# Altium footprint library 1.10-电容.PcbLib: 193 footprints (part 7 of 13)
Each footprint in its own frame and in the unit in brackets; x right, y up, seen from the top. Pads: shape width x height; smd on the part's side, far side on the other; paste and mask are expansions set on the pad; w line width, h text height; cw(c..) or ccw(c..) is an arc to the next point about the centre after c.
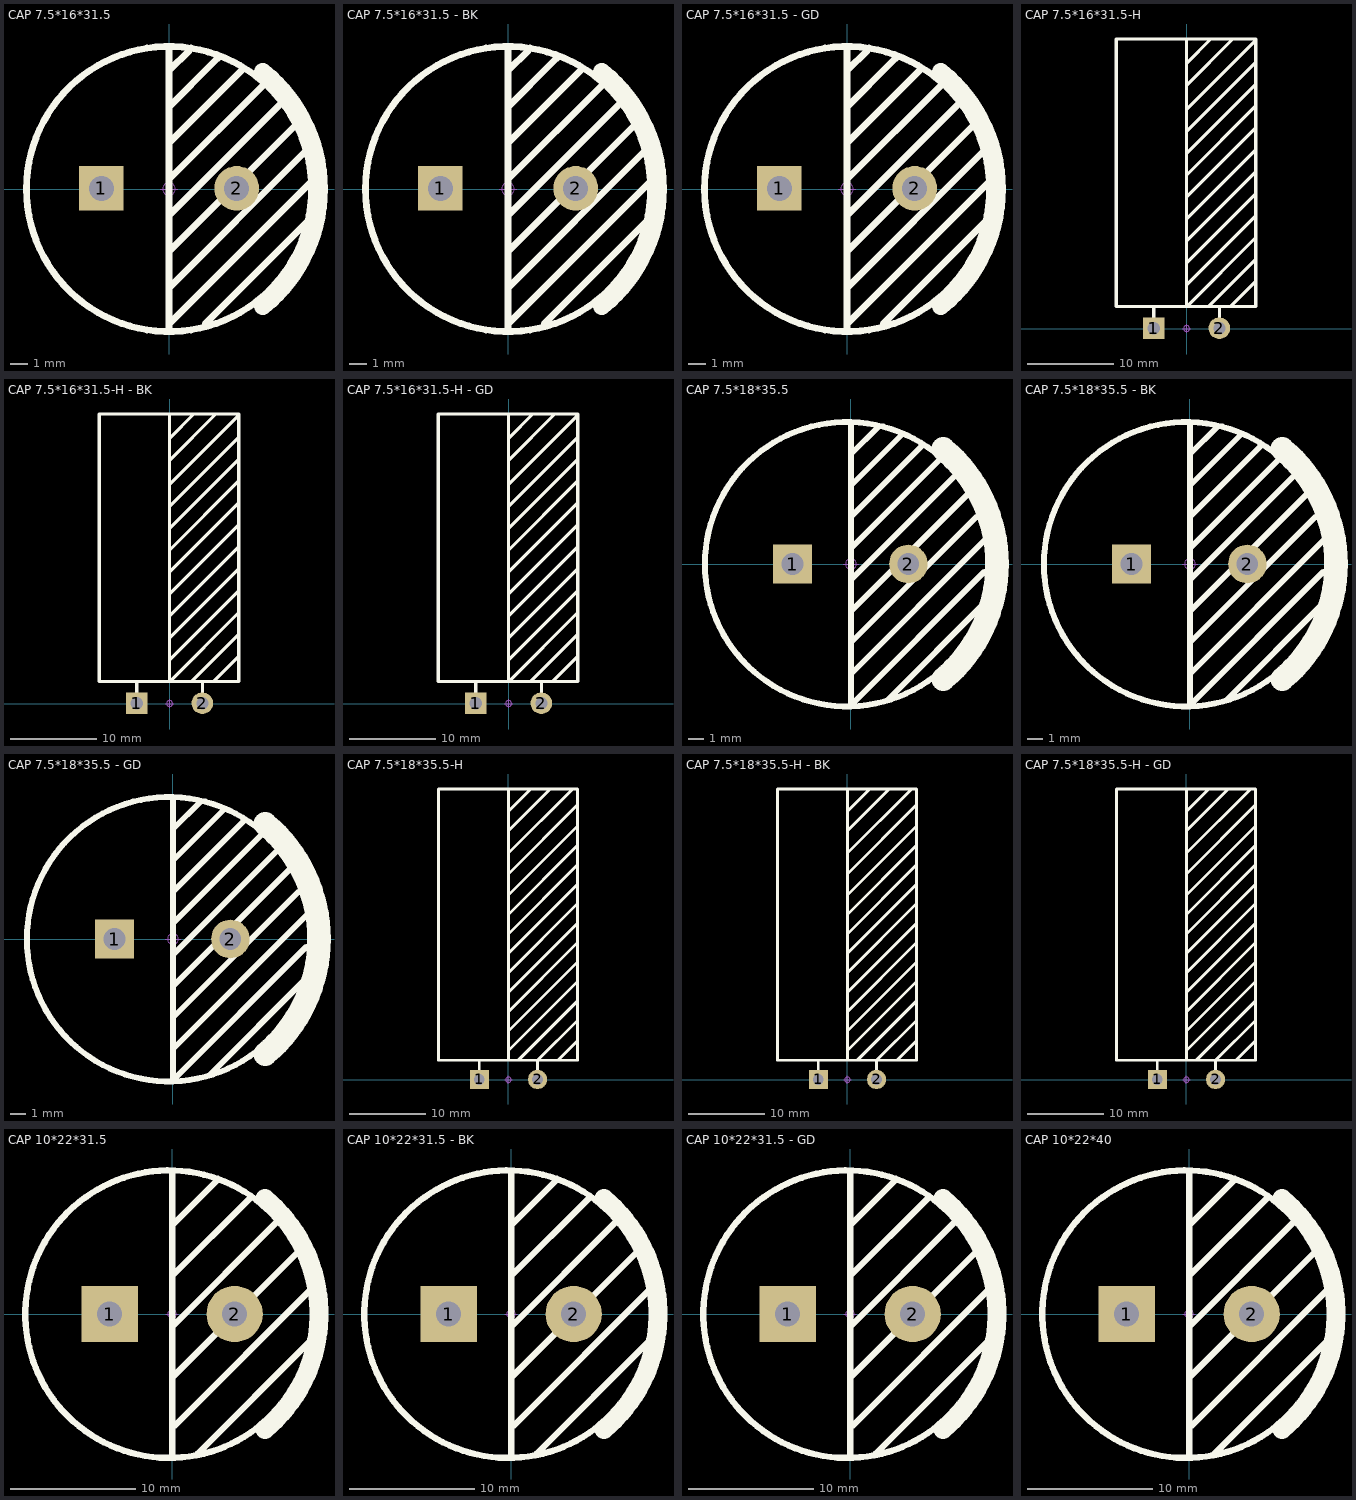
[diagram p6: the footprints below, top view; thin cyan lines are the x and y axes]

## CAP 7.5*16*31.5 [mm] "脚距7.5mm直径16mm高度31.5mm"
pads (2):
  rect 2.5x2.5 hole 1.4: 1(-3.8,0.038)
  round 2.5 hole 1.4: 2(3.8,0.038)
Top Overlay:
  circle w0.381: c0,0 r8
  lines w0.381: 0,-7.963 0,7.963 ; 0,-7.582 8.001,0.419 ; 0,-5.55 7.62,2.07 ; 0,-3.518 6.972,3.454 ; 0,-1.486 6.223,4.737 ; 0,0.546 5.296,5.842 ; 0,2.578 4.064,6.642 ; 0,4.61 2.54,7.15 2.769,7.379 ; 0,6.642 1.143,7.785 ; 2.032,-7.582 6.604,-3.01 7.81,-1.803
  lines w1: 5.259,-6.574 ccw(c0,0) 5.259,6.574
Mechanical 15:
  circle w0.05: c0,0 r0.35
  lines w0.05: -0.5,0 0.5,0 ; 0,-0.5 0,0.5
3D body "CAP 7.5X16X31.STEP": height 31.53, standoff -3.38, extent -8,-7.998 8.01,7.998

## CAP 7.5*16*31.5 - BK [mm] "脚距7.5mm直径16mm高度31.5mm"
pads (2):
  rect 2.5x2.5 hole 1.4: 1(-3.8,0.038)
  round 2.5 hole 1.4: 2(3.8,0.038)
Top Overlay:
  circle w0.381: c0,0 r8
  lines w0.381: 0,-7.963 0,7.963 ; 0,-7.582 8.001,0.419 ; 0,-5.55 7.62,2.07 ; 0,-3.518 6.972,3.454 ; 0,-1.486 6.223,4.737 ; 0,0.546 5.296,5.842 ; 0,2.578 4.064,6.642 ; 0,4.61 2.54,7.15 2.769,7.379 ; 0,6.642 1.143,7.785 ; 2.032,-7.582 6.604,-3.01 7.81,-1.803
  lines w1: 5.259,-6.574 ccw(c0,0) 5.259,6.574
Mechanical 15:
  circle w0.05: c0,0 r0.35
  lines w0.05: -0.5,0 0.5,0 ; 0,-0.5 0,0.5
3D body "CAP 7.5X16X31.5.STEP": height 31.54, standoff -3.37, extent -8,-7.998 8.01,7.998

## CAP 7.5*16*31.5 - GD [mm] "脚距7.5mm直径16mm高度31.5mm"
pads (2):
  rect 2.5x2.5 hole 1.4: 1(-3.8,0.038)
  round 2.5 hole 1.4: 2(3.8,0.038)
Top Overlay:
  circle w0.381: c0,0 r8
  lines w0.381: 0,-7.963 0,7.963 ; 0,-7.582 8.001,0.419 ; 0,-5.55 7.62,2.07 ; 0,-3.518 6.972,3.454 ; 0,-1.486 6.223,4.737 ; 0,0.546 5.296,5.842 ; 0,2.578 4.064,6.642 ; 0,4.61 2.54,7.15 2.769,7.379 ; 0,6.642 1.143,7.785 ; 2.032,-7.582 6.604,-3.01 7.81,-1.803
  lines w1: 5.259,-6.574 ccw(c0,0) 5.259,6.574
Mechanical 15:
  circle w0.05: c0,0 r0.35
  lines w0.05: -0.5,0 0.5,0 ; 0,-0.5 0,0.5
3D body "CAP 7.5X16X31.5.STEP": height 31.54, standoff -3.37, extent -8,-7.998 8.01,7.998

## CAP 7.5*16*31.5-H [mm] "脚距7.5mm直径16mm高度31.5mm"
pads (2):
  rect 2.5x2.5 hole 1.4: 1(-3.8,0.038)
  round 2.5 hole 1.4: 2(3.8,0.038)
Top Overlay:
  lines w0.381: -3.81,1.27 -3.81,2.54 ; 0,5.08 8.001,13.081 ; 0,7.62 7.938,15.557 ; 0,10.16 7.938,18.098 ; 0,12.7 7.938,20.637 ; 0,15.24 7.938,23.177 ; 0,17.78 7.938,25.717 ; 0,20.32 7.938,28.258 ; 0,22.86 7.938,30.797 ; 0,25.4 7.929,33.329 ; 0,28.194 5.334,33.528 ; 0,30.734 2.794,33.528 ; 0,33.528 0,2.54 8.001,10.541 ; 2.54,2.54 8.001,8.001 ; 3.81,1.27 3.81,2.54 ; 5.08,2.54 8.001,5.461 ; -8.128,2.54 8.001,2.54 8.001,33.528 -8.128,33.528 -8.128,2.54
Mechanical 15:
  circle w0.05: c0,0 r0.35
  lines w0.05: -0.5,0 0.5,0 ; 0,-0.5 0,0.5
3D body "CAP 7.5X16X31.5-H.STEP": height 16.03, standoff -3.47, extent -8.05,-0.462 7.96,33.448

## CAP 7.5*16*31.5-H - BK [mm] "脚距7.5mm直径16mm高度31.5mm          淘宝ID:黄晶宝石"
pads (2):
  rect 2.5x2.5 hole 1.4: 1(-3.8,0.038)
  round 2.5 hole 1.4: 2(3.8,0.038)
Top Overlay:
  lines w0.381: -3.81,1.27 -3.81,2.54 ; 0,5.08 8.001,13.081 ; 0,7.62 7.938,15.557 ; 0,10.16 7.938,18.098 ; 0,12.7 7.938,20.637 ; 0,15.24 7.938,23.177 ; 0,17.78 7.938,25.717 ; 0,20.32 7.938,28.258 ; 0,22.86 7.938,30.797 ; 0,25.4 7.929,33.329 ; 0,28.194 5.334,33.528 ; 0,30.734 2.794,33.528 ; 0,33.528 0,2.54 8.001,10.541 ; 2.54,2.54 8.001,8.001 ; 3.81,1.27 3.81,2.54 ; 5.08,2.54 8.001,5.461 ; -8.128,2.54 -8.128,33.528 8.001,33.528 8.001,2.54 -8.128,2.54
Mechanical 15:
  circle w0.05: c0,0 r0.35
  lines w0.05: -0.5,0 0.5,0 ; 0,-0.5 0,0.5
3D body "CAP 7.5X16X31.5-H.STEP": height 16.03, standoff -3.48, extent -8.05,-0.462 7.96,33.448

## CAP 7.5*16*31.5-H - GD [mm] "脚距7.5mm直径16mm高度31.5mm"
pads (2):
  rect 2.5x2.5 hole 1.4: 1(-3.8,0.038)
  round 2.5 hole 1.4: 2(3.8,0.038)
Top Overlay:
  lines w0.381: -3.81,1.27 -3.81,2.54 ; 0,5.08 8.001,13.081 ; 0,7.62 7.938,15.557 ; 0,10.16 7.938,18.098 ; 0,12.7 7.938,20.637 ; 0,15.24 7.938,23.177 ; 0,17.78 7.938,25.717 ; 0,20.32 7.938,28.258 ; 0,22.86 7.938,30.797 ; 0,25.4 7.929,33.329 ; 0,28.194 5.334,33.528 ; 0,30.734 2.794,33.528 ; 0,33.528 0,2.54 8.001,10.541 ; 2.54,2.54 8.001,8.001 ; 3.81,1.27 3.81,2.54 ; 5.08,2.54 8.001,5.461 ; -8.128,2.54 8.001,2.54 8.001,33.528 -8.128,33.528 -8.128,2.54
Mechanical 15:
  circle w0.05: c0,0 r0.35
  lines w0.05: -0.5,0 0.5,0 ; 0,-0.5 0,0.5
3D body "CAP 7.5X16X31.5-H.STEP": height 16.03, standoff -3.48, extent -8.05,-0.462 7.96,33.448

## CAP 7.5*18*35.5 [mm] "脚距7.5mm直径18mm高度35.5mm            淘宝ID:黄晶宝石"
pads (2):
  rect 2.5x2.5 hole 1.4: 1(-3.78,0)
  round 2.5 hole 1.4: 2(3.72,0)
Top Overlay:
  circle w0.381: c-0.248,-0.013 r9.2
  lines w0.381: 0,-7.112 8.636,1.524 ; 0,-5.08 8.128,3.048 ; 0,-3.048 7.62,4.572 ; 0,-1.016 6.731,5.715 ; 0,1.016 5.715,6.731 ; 0,3.048 4.572,7.62 ; 0,5.08 3.302,8.382 ; 0,7.112 1.778,8.89 ; 0,9.144 0,-9.144 8.636,-0.508 ; 2.413,-8.763 8.636,-2.54
  lines w1.524: 5.959,-7.456 ccw(c-0.254,0) 5.959,7.456
Mechanical 15:
  circle w0.05: c0,0 r0.35
  lines w0.05: -0.5,0 0.5,0 ; 0,-0.5 0,0.5
3D body "CAP 7.5X18X35.5.STEP": height 35.54, standoff -3.37, extent -9,-8.997 9.01,8.997

## CAP 7.5*18*35.5 - BK [mm] "脚距7.5mm直径18mm高度35.5mm"
pads (2):
  rect 2.5x2.5 hole 1.4: 1(-3.78,0)
  round 2.5 hole 1.4: 2(3.72,0)
Top Overlay:
  circle w0.381: c-0.248,-0.013 r9.2
  lines w0.381: 0,-7.112 8.636,1.524 ; 0,-5.08 8.128,3.048 ; 0,-3.048 7.62,4.572 ; 0,-1.016 6.731,5.715 ; 0,1.016 5.715,6.731 ; 0,3.048 4.572,7.62 ; 0,5.08 3.302,8.382 ; 0,7.112 1.778,8.89 ; 0,9.144 0,-9.144 8.636,-0.508 ; 2.413,-8.763 8.636,-2.54
  lines w1.524: 5.959,-7.456 ccw(c-0.254,0) 5.959,7.456
Mechanical 15:
  circle w0.05: c0,0 r0.35
  lines w0.05: -0.5,0 0.5,0 ; 0,-0.5 0,0.5
3D body "CAP 7.5X18X35.5.STEP": height 35.54, standoff -3.37, extent -9,-8.997 9.01,8.997

## CAP 7.5*18*35.5 - GD [mm] "脚距7.5mm直径18mm高度35.5mm"
pads (2):
  rect 2.5x2.5 hole 1.4: 1(-3.78,0)
  round 2.5 hole 1.4: 2(3.72,0)
Top Overlay:
  circle w0.381: c-0.248,-0.013 r9.2
  lines w0.381: 0,-7.112 8.636,1.524 ; 0,-5.08 8.128,3.048 ; 0,-3.048 7.62,4.572 ; 0,-1.016 6.731,5.715 ; 0,1.016 5.715,6.731 ; 0,3.048 4.572,7.62 ; 0,5.08 3.302,8.382 ; 0,7.112 1.778,8.89 ; 0,9.144 0,-9.144 8.636,-0.508 ; 2.413,-8.763 8.636,-2.54
  lines w1.524: 5.959,-7.456 ccw(c-0.254,0) 5.959,7.456
Mechanical 15:
  circle w0.05: c0,0 r0.35
  lines w0.05: -0.5,0 0.5,0 ; 0,-0.5 0,0.5
3D body "CAP 7.5X18X35.5.STEP": height 35.56, standoff -3.35, extent -8.989,-8.992 9.021,9.002

## CAP 7.5*18*35.5-H [mm] "脚距7.5mm直径18mm高度35.5mm"
pads (2):
  rect 2.5x2.5 hole 1.4: 1(-3.8,0.038)
  round 2.5 hole 1.4: 2(3.8,0.038)
Top Overlay:
  lines w0.381: -3.81,1.27 -3.81,2.54 ; 0,2.54 0,37.98 ; 0,3.81 8.955,12.765 ; 0,6.35 8.975,15.325 ; 0,8.89 8.965,17.855 ; 0,11.43 8.985,20.415 ; 0,13.97 8.975,22.945 ; 0,16.51 8.965,25.475 ; 0,19.05 8.985,28.035 ; 0,21.59 8.975,30.565 ; 0,24.13 8.965,33.095 ; 0,26.88 8.97,35.85 ; 0.02,29.62 8.36,37.96 ; 0.06,32.597 5.394,37.931 ; 0.06,35.137 2.854,37.931 ; 1.27,2.54 8.995,10.265 ; 3.81,1.27 3.81,2.54 9.005,7.735 ; 6.477,2.54 8.989,5.052 ; -9.12,2.54 -9.12,37.98 9,37.98 9,2.54 -9.12,2.54
Mechanical 15:
  circle w0.05: c0,0 r0.35
  lines w0.05: -0.5,0 0.5,0 ; 0,-0.5 0,0.5
3D body "CAP 7.5X18X35.5-H.STEP": height 18.03, standoff -3.47, extent -9.05,-0.462 8.96,37.948

## CAP 7.5*18*35.5-H - BK [mm] "脚距7.5mm直径18mm高度35.5mm"
pads (2):
  rect 2.5x2.5 hole 1.4: 1(-3.8,0.038)
  round 2.5 hole 1.4: 2(3.8,0.038)
Top Overlay:
  lines w0.381: -3.81,1.27 -3.81,2.54 ; 0,2.54 0,37.98 ; 0,3.81 8.955,12.765 ; 0,6.35 8.975,15.325 ; 0,8.89 8.965,17.855 ; 0,11.43 8.985,20.415 ; 0,13.97 8.975,22.945 ; 0,16.51 8.965,25.475 ; 0,19.05 8.985,28.035 ; 0,21.59 8.975,30.565 ; 0,24.13 8.965,33.095 ; 0,26.88 8.97,35.85 ; 0.02,29.62 8.36,37.96 ; 0.06,32.597 5.394,37.931 ; 0.06,35.137 2.854,37.931 ; 1.27,2.54 8.995,10.265 ; 3.81,1.27 3.81,2.54 9.005,7.735 ; 6.477,2.54 8.989,5.052 ; -9.12,2.54 9,2.54 9,37.98 -9.12,37.98 -9.12,2.54
Mechanical 15:
  circle w0.05: c0,0 r0.35
  lines w0.05: -0.5,0 0.5,0 ; 0,-0.5 0,0.5
3D body "CAP 7.5X18X35.5-H.STEP": height 18.03, standoff -3.48, extent -9.05,-0.462 8.96,37.948

## CAP 7.5*18*35.5-H - GD [mm] "脚距7.5mm直径18mm高度35.5mm"
pads (2):
  rect 2.5x2.5 hole 1.4: 1(-3.8,0.038)
  round 2.5 hole 1.4: 2(3.8,0.038)
Top Overlay:
  lines w0.381: -3.81,1.27 -3.81,2.54 ; 0,2.54 0,37.98 ; 0,3.81 8.955,12.765 ; 0,6.35 8.975,15.325 ; 0,8.89 8.965,17.855 ; 0,11.43 8.985,20.415 ; 0,13.97 8.975,22.945 ; 0,16.51 8.965,25.475 ; 0,19.05 8.985,28.035 ; 0,21.59 8.975,30.565 ; 0,24.13 8.965,33.095 ; 0,26.88 8.97,35.85 ; 0.02,29.62 8.36,37.96 ; 0.06,32.597 5.394,37.931 ; 0.06,35.137 2.854,37.931 ; 1.27,2.54 8.995,10.265 ; 3.81,1.27 3.81,2.54 9.005,7.735 ; 6.477,2.54 8.989,5.052 ; -9.12,2.54 -9.12,37.98 9,37.98 9,2.54 -9.12,2.54
Mechanical 15:
  circle w0.05: c0,0 r0.35
  lines w0.05: -0.5,0 0.5,0 ; 0,-0.5 0,0.5
3D body "CAP 7.5X18X35.5-H.STEP": height 18.03, standoff -3.48, extent -9.05,-0.462 8.96,37.948

## CAP 10*22*31.5 [mm] "脚距10mm直径22mm高度31.5mm"
pads (2):
  rect 4.5x4.5 hole 2: 1(-5,0)
  round 4.5 hole 2: 2(5,0)
Top Overlay:
  circle w0.508: c-0.248,-0.013 r11.5
  lines w0.508: 0,-11.25 0,11.25 ; 0,-5.08 10.033,4.953 ; 0,-1.016 8.382,7.366 ; 0,3.048 6.223,9.271 ; 0,7.112 3.556,10.668 ; 0.254,-8.89 11.43,2.286 ; 2.032,-11.176 11.049,-2.159
  lines w1.524: 7.428,-9.219 ccw(c-0.254,0) 7.428,9.219
Mechanical 15:
  circle w0.05: c0,0 r0.35
  lines w0.05: -0.5,0 0.5,0 ; 0,-0.5 0,0.5
3D body "CAP 10X22X31.5.STEP": height 31.53, standoff -3.38, extent -11,-10.997 11.01,10.997

## CAP 10*22*31.5 - BK [mm] "脚距10mm直径22mm高度31.5mm"
pads (2):
  rect 4.5x4.5 hole 2: 1(-5,0)
  round 4.5 hole 2: 2(5,0)
Top Overlay:
  circle w0.508: c-0.248,-0.013 r11.5
  lines w0.508: 0,-11.25 0,11.25 ; 0,-5.08 10.033,4.953 ; 0,-1.016 8.382,7.366 ; 0,3.048 6.223,9.271 ; 0,7.112 3.556,10.668 ; 0.254,-8.89 11.43,2.286 ; 2.032,-11.176 11.049,-2.159
  lines w1.524: 7.428,-9.219 ccw(c-0.254,0) 7.428,9.219
Mechanical 15:
  circle w0.05: c0,0 r0.35
  lines w0.05: -0.5,0 0.5,0 ; 0,-0.5 0,0.5
3D body "CAP 10X22X31.5.STEP": height 31.54, standoff -3.37, extent -11,-10.997 11.01,10.997

## CAP 10*22*31.5 - GD [mm] "脚距10mm直径22mm高度31.5mm"
pads (2):
  rect 4.5x4.5 hole 2: 1(-5,0)
  round 4.5 hole 2: 2(5,0)
Top Overlay:
  circle w0.508: c-0.248,-0.013 r11.5
  lines w0.508: 0,-11.25 0,11.25 ; 0,-5.08 10.033,4.953 ; 0,-1.016 8.382,7.366 ; 0,3.048 6.223,9.271 ; 0,7.112 3.556,10.668 ; 0.254,-8.89 11.43,2.286 ; 2.032,-11.176 11.049,-2.159
  lines w1.524: 7.428,-9.219 ccw(c-0.254,0) 7.428,9.219
Mechanical 15:
  circle w0.05: c0,0 r0.35
  lines w0.05: -0.5,0 0.5,0 ; 0,-0.5 0,0.5
3D body "CAP 10X22X31.5.STEP": height 31.54, standoff -3.37, extent -11,-10.997 11.01,10.997

## CAP 10*22*40 [mm] "脚距10mm直径22mm高度40mm      淘宝ID:黄晶宝石"
pads (2):
  rect 4.5x4.5 hole 2: 1(-5,0)
  round 4.5 hole 2: 2(5,0)
Top Overlay:
  circle w0.508: c-0.248,-0.013 r11.5
  lines w0.508: 0,-11.25 0,11.25 ; 0,-5.08 10.033,4.953 ; 0,-1.016 8.382,7.366 ; 0,3.048 6.223,9.271 ; 0,7.112 3.556,10.668 ; 0.254,-8.89 11.43,2.286 ; 1.968,-11.239 11.049,-2.159
  lines w1.524: 7.428,-9.219 ccw(c-0.254,0) 7.428,9.219
Mechanical 15:
  circle w0.05: c0,0 r0.35
  lines w0.05: -0.5,0 0.5,0 ; 0,-0.5 0,0.5
3D body "CAP 10X22X40.STEP": height 40.03, standoff -3.38, extent -11,-10.999 11.01,10.999